# Altium footprint library Terminal_Blocks_Pluggable PCB_5.08mm.PcbLib: 299 footprints (part 17 of 19)
Each footprint in its own frame and in the unit in brackets; x right, y up, seen from the top. Pads: shape width x height; smd on the part's side, far side on the other; paste and mask are expansions set on the pad; w line width, h text height; cw(c..) or ccw(c..) is an arc to the next point about the centre after c.
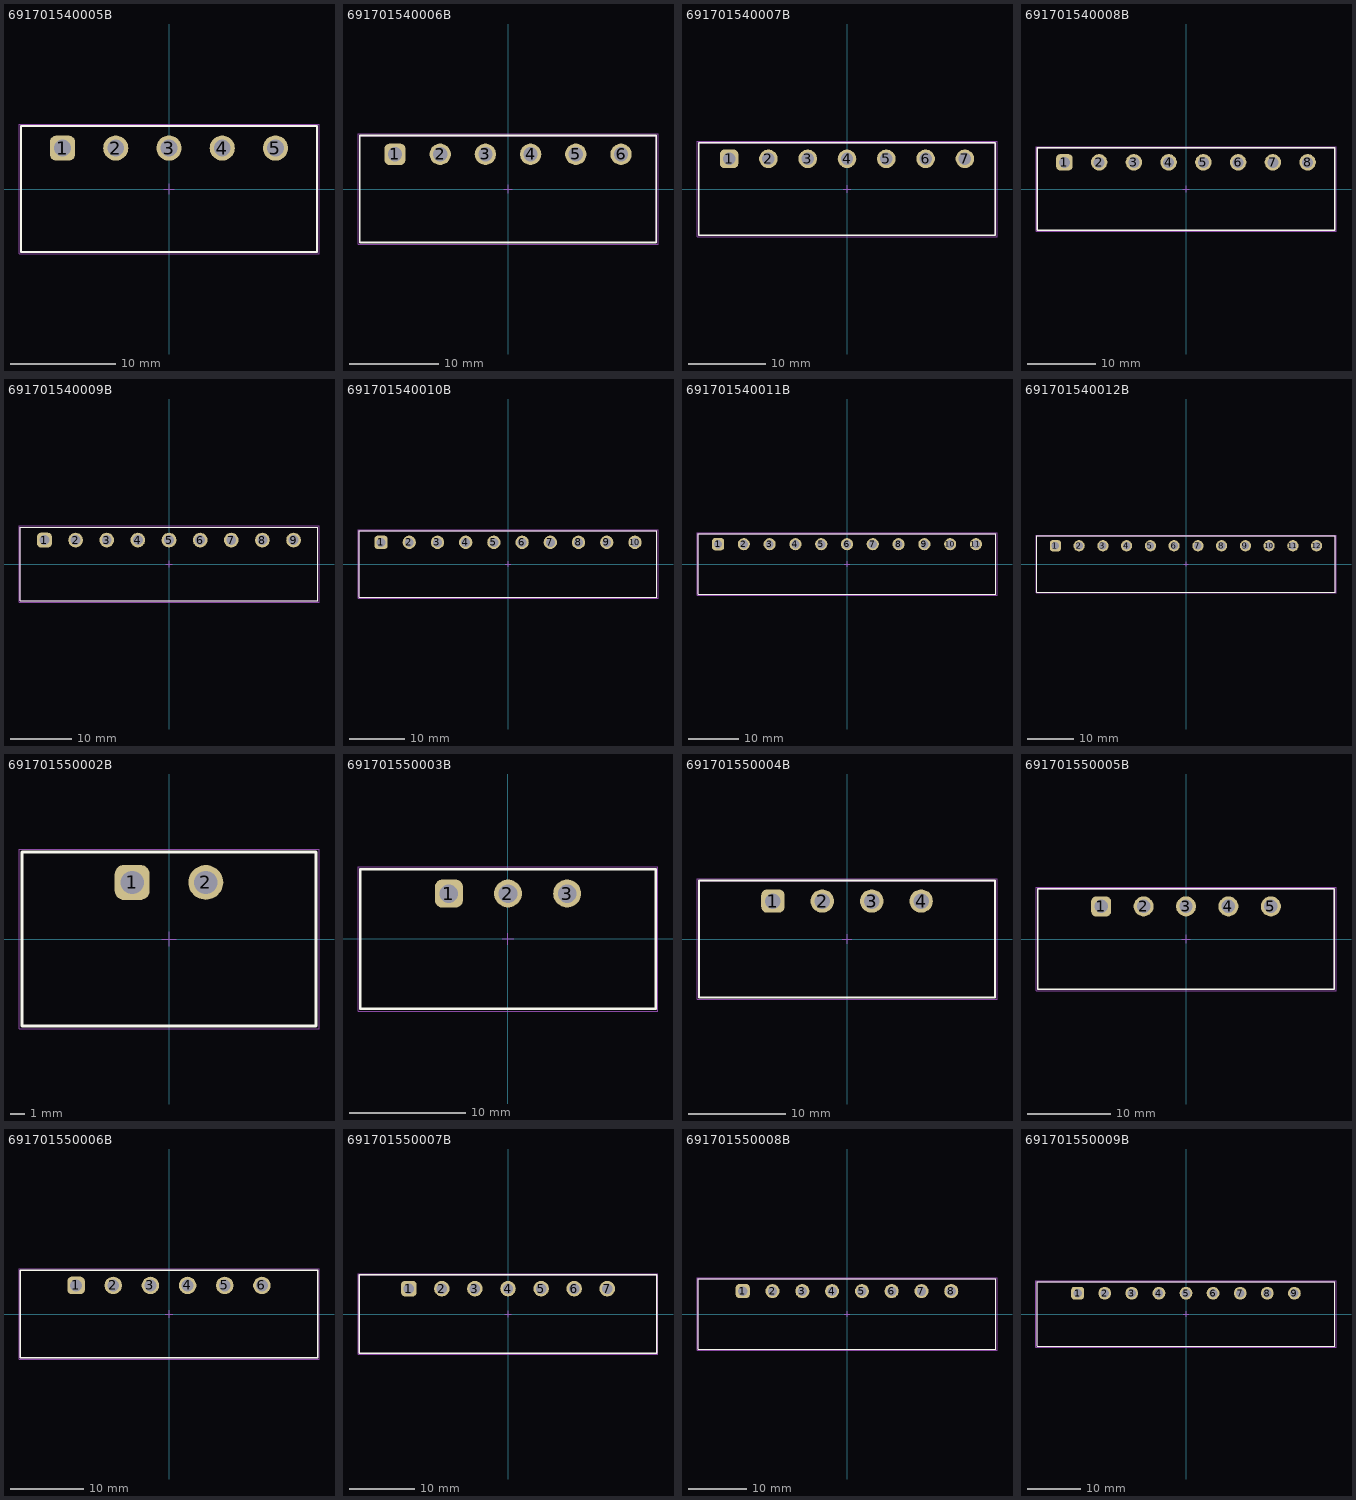
[diagram p16: the footprints below, top view; thin cyan lines are the x and y axes]

## 691701540005B [mm] "THR - 5,08mm - PCB Horizontal Close - 05p"
height 8.5
pads (5):
  rrect50% 2.4x2.4 hole 1.6: 1(-10.16,3.9)
  round 2.4 hole 1.6: 2(-5.08,3.9) 3(0,3.9) 4(5.08,3.9) 5(10.16,3.9)
Top Overlay:
  lines w0.2: -14.11,-6 14.11,-6 14.11,6 -14.11,6 -14.11,-6
Top Designator:
  text ".Designator" at -7.498,-0.5 h1.5
Top Component Outline:
  lines w0.1: -14.11,-6 -14.11,6 14.11,6 14.11,-6 -14.11,-6
Top 3D Body:
  lines w0.1: -14.11,-6 14.11,-6 14.11,6 -14.11,6 -14.11,-6
Top Courtyard:
  lines w0.05: -14.31,-6.2 -14.31,6.2 14.31,6.2 14.31,-6.2 -14.31,-6.2
Top Component Center:
  lines w0.05: -0.5,0 0.5,0 ; 0,-0.5 0,0.5
3D body "691701540005B.stp": height 8.6, standoff -2.7, extent -14.1,-6 14.1,6

## 691701540006B [mm] "THR - 5,08mm - PCB Horizontal Close - 06p"
height 8.5
pads (6):
  rrect50% 2.4x2.4 hole 1.6: 1(-12.7,3.9)
  round 2.4 hole 1.6: 2(-7.62,3.9) 3(-2.54,3.9) 4(2.54,3.9) 5(7.62,3.9) 6(12.7,3.9)
Top Overlay:
  lines w0.2: -16.65,-6 16.65,-6 16.65,6 -16.65,6 -16.65,-6
Top Designator:
  text ".Designator" at -7.498,-0.5 h1.5
Top Component Outline:
  lines w0.1: -16.65,-6 -16.65,6 16.65,6 16.65,-6 -16.65,-6
Top 3D Body:
  lines w0.1: -16.65,-6 16.65,-6 16.65,6 -16.65,6 -16.65,-6
Top Courtyard:
  lines w0.05: -16.85,-6.2 -16.85,6.2 16.85,6.2 16.85,-6.2 -16.85,-6.2
Top Component Center:
  lines w0.05: -0.5,0 0.5,0 ; 0,-0.5 0,0.5
3D body "691701540006B.stp": height 8.6, standoff -2.7, extent -16.64,-6 16.64,6

## 691701540007B [mm] "THR - 5,08mm - PCB Horizontal Close - 07p"
height 8.5
pads (7):
  rrect50% 2.4x2.4 hole 1.6: 1(-15.24,3.9)
  round 2.4 hole 1.6: 2(-10.16,3.9) 3(-5.08,3.9) 4(0,3.9) 5(5.08,3.9) 6(10.16,3.9) 7(15.24,3.9)
Top Overlay:
  lines w0.2: -19.19,-6 -19.19,6 19.19,6 19.19,-6 -19.19,-6
Top Designator:
  text ".Designator" at -7.498,-0.5 h1.5
Top Component Outline:
  lines w0.1: -19.19,-6 19.19,-6 19.19,6 -19.19,6 -19.19,-6
Top 3D Body:
  lines w0.1: -19.19,-6 -19.19,6 19.19,6 19.19,-6 -19.19,-6
Top Courtyard:
  lines w0.05: -19.39,-6.2 19.39,-6.2 19.39,6.2 -19.39,6.2 -19.39,-6.2
Top Component Center:
  lines w0.05: -0.5,0 0.5,0 ; 0,-0.5 0,0.5
3D body "691701540007B.stp": height 8.6, standoff -2.7, extent -19.18,-6 19.18,6

## 691701540008B [mm] "THR - 5,08mm - PCB Horizontal Close - 08p"
height 8.5
pads (8):
  rrect50% 2.4x2.4 hole 1.6: 1(-17.78,3.9)
  round 2.4 hole 1.6: 2(-12.7,3.9) 3(-7.62,3.9) 4(-2.54,3.9) 5(2.54,3.9) 6(7.62,3.9) 7(12.7,3.9) 8(17.78,3.9)
Top Overlay:
  lines w0.2: -21.73,-6 -21.73,6 21.73,6 21.73,-6 -21.73,-6
Top Designator:
  text ".Designator" at -7.498,-0.5 h1.5
Top Component Outline:
  lines w0.1: -21.73,-6 21.73,-6 21.73,6 -21.73,6 -21.73,-6
Top 3D Body:
  lines w0.1: -21.73,-6 -21.73,6 21.73,6 21.73,-6 -21.73,-6
Top Courtyard:
  lines w0.05: -21.93,-6.2 21.93,-6.2 21.93,6.2 -21.93,6.2 -21.93,-6.2
Top Component Center:
  lines w0.05: -0.5,0 0.5,0 ; 0,-0.5 0,0.5
3D body "691701540008B.stp": height 8.6, standoff -2.7, extent -21.72,-6 21.72,6

## 691701540009B [mm] "THR - 5,08mm - PCB Horizontal Close - 09p"
height 8.5
pads (9):
  rrect50% 2.4x2.4 hole 1.6: 1(-20.32,3.9)
  round 2.4 hole 1.6: 2(-15.24,3.9) 3(-10.16,3.9) 4(-5.08,3.9) 5(0,3.9) 6(5.08,3.9) 7(10.16,3.9) 8(15.24,3.9) 9(20.32,3.9)
Top Overlay:
  lines w0.2: -24.27,-6 -24.27,6 24.27,6 24.27,-6 -24.27,-6
Top Designator:
  text ".Designator" at -7.498,-0.5 h1.5
Top Component Outline:
  lines w0.1: -24.27,-6 24.27,-6 24.27,6 -24.27,6 -24.27,-6
Top 3D Body:
  lines w0.1: -24.27,-6 -24.27,6 24.27,6 24.27,-6 -24.27,-6
Top Courtyard:
  lines w0.05: -24.47,-6.2 24.47,-6.2 24.47,6.2 -24.47,6.2 -24.47,-6.2
Top Component Center:
  lines w0.05: -0.5,0 0.5,0 ; 0,-0.5 0,0.5
3D body "691701540009B.stp": height 8.6, standoff -2.7, extent -24.26,-6 24.26,6

## 691701540010B [mm] "THR - 5,08mm - PCB Horizontal Close - 10p"
height 8.5
pads (10):
  rrect50% 2.4x2.4 hole 1.6: 1(-22.86,3.9)
  round 2.4 hole 1.6: 2(-17.78,3.9) 3(-12.7,3.9) 4(-7.62,3.9) 5(-2.54,3.9) 6(2.54,3.9) 7(7.62,3.9) 8(12.7,3.9) 9(17.78,3.9) 10(22.86,3.9)
Top Overlay:
  lines w0.2: -26.81,-6 -26.81,6 26.81,6 26.81,-6 -26.81,-6
Top Designator:
  text ".Designator" at -7.498,-0.5 h1.5
Top Component Outline:
  lines w0.1: -26.81,-6 26.81,-6 26.81,6 -26.81,6 -26.81,-6
Top 3D Body:
  lines w0.1: -26.81,-6 -26.81,6 26.81,6 26.81,-6 -26.81,-6
Top Courtyard:
  lines w0.05: -27.01,-6.2 27.01,-6.2 27.01,6.2 -27.01,6.2 -27.01,-6.2
Top Component Center:
  lines w0.05: -0.5,0 0.5,0 ; 0,-0.5 0,0.5
3D body "691701540010B.stp": height 8.6, standoff -2.7, extent -26.8,-6 26.8,6

## 691701540011B [mm] "THR - 5,08mm - PCB Horizontal Close - 11p"
height 8.5
pads (11):
  rrect50% 2.4x2.4 hole 1.6: 1(-25.4,3.9)
  round 2.4 hole 1.6: 2(-20.32,3.9) 3(-15.24,3.9) 4(-10.16,3.9) 5(-5.08,3.9) 6(0,3.9) 7(5.08,3.9) 8(10.16,3.9) 9(15.24,3.9) 10(20.32,3.9) 11(25.4,3.9)
Top Overlay:
  lines w0.2: -29.35,-6 -29.35,6 29.35,6 29.35,-6 -29.35,-6
Top Designator:
  text ".Designator" at -7.498,-0.5 h1.5
Top Component Outline:
  lines w0.1: -29.35,-6 29.35,-6 29.35,6 -29.35,6 -29.35,-6
Top 3D Body:
  lines w0.1: -29.35,-6 -29.35,6 29.35,6 29.35,-6 -29.35,-6
Top Courtyard:
  lines w0.05: -29.55,-6.2 29.55,-6.2 29.55,6.2 -29.55,6.2 -29.55,-6.2
Top Component Center:
  lines w0.05: -0.5,0 0.5,0 ; 0,-0.5 0,0.5
3D body "691701540011B.stp": height 8.6, standoff -2.7, extent -29.34,-6 29.34,6

## 691701540012B [mm] "THR - 5,08mm - PCB Horizontal Close - 12p"
height 8.5
pads (12):
  rrect50% 2.4x2.4 hole 1.6: 1(-27.94,3.9)
  round 2.4 hole 1.6: 2(-22.86,3.9) 3(-17.78,3.9) 4(-12.7,3.9) 5(-7.62,3.9) 6(-2.54,3.9) 7(2.54,3.9) 8(7.62,3.9) 9(12.7,3.9) 10(17.78,3.9) 11(22.86,3.9) 12(27.94,3.9)
Top Overlay:
  lines w0.2: -31.89,-6 -31.89,6 31.89,6 31.89,-6 -31.89,-6
Top Designator:
  text ".Designator" at -7.498,-0.5 h1.5
Top Component Outline:
  lines w0.1: -31.89,-6 31.89,-6 31.89,6 -31.89,6 -31.89,-6
Top 3D Body:
  lines w0.1: -31.89,-6 -31.89,6 31.89,6 31.89,-6 -31.89,-6
Top Courtyard:
  lines w0.05: -32.09,-6.2 32.09,-6.2 32.09,6.2 -32.09,6.2 -32.09,-6.2
Top Component Center:
  lines w0.05: -0.5,0 0.5,0 ; 0,-0.5 0,0.5
3D body "691701540012B.stp": height 8.6, standoff -2.7, extent -31.88,-6 31.88,6

## 691701550002B [mm] "THR - 5,08mm - PCB Horizontal Flange - 02p"
height 8.4
pads (2):
  rrect50% 2.4x2.4 hole 1.6: 1(-2.54,3.9)
  round 2.4 hole 1.6: 2(2.54,3.9)
Top Overlay:
  lines w0.2: -10.14,-6 10.14,-6 10.14,6 -10.14,6 -10.14,-6
Top Designator:
  text ".Designator" at -7.498,-0.5 h1.5
Top Component Outline:
  lines w0.1: -10.14,-6 -10.14,6 10.14,6 10.14,-6 -10.14,-6
Top 3D Body:
  lines w0.1: -10.14,-6 10.14,-6 10.14,6 -10.14,6 -10.14,-6
Top Courtyard:
  lines w0.05: -10.34,-6.2 10.34,-6.2 10.34,6.2 -10.34,6.2 -10.34,-6.2
Top Component Center:
  lines w0.05: -0.5,0 0.5,0 ; 0,-0.5 0,0.5
3D body "691701550002B.stp": height 8.55, standoff -2.75, extent -10.14,-6 10.18,6

## 691701550003B [mm] "THR - 5,08mm - PCB Horizontal Flange - 03p"
height 8.4
pads (3):
  rrect50% 2.4x2.4 hole 1.6: 1(-5.08,3.9)
  round 2.4 hole 1.6: 2(0,3.9) 3(5.08,3.9)
Top Overlay:
  lines w0.2: -12.68,-6 12.68,-6 12.68,6 -12.68,6 -12.68,-6
Top Designator:
  text ".Designator" at -7.498,-0.5 h1.5
Top Component Outline:
  lines w0.1: -12.68,-6 -12.68,6 12.68,6 12.68,-6 -12.68,-6
Top 3D Body:
  lines w0.1: -12.68,-6 12.68,-6 12.68,6 -12.68,6 -12.68,-6
Top Courtyard:
  lines w0.05: -12.88,-6.2 12.88,-6.2 12.88,6.2 -12.88,6.2 -12.88,-6.2
Top Component Center:
  lines w0.05: -0.5,0 0.5,0 ; 0,-0.5 0,0.5
3D body "691701550003B.stp": height 8.55, standoff -2.75, extent -12.7,-6 12.7,6

## 691701550004B [mm] "THR - 5,08mm - PCB Horizontal Flange - 04p"
height 8.4
pads (4):
  rrect50% 2.4x2.4 hole 1.6: 1(-7.62,3.9)
  round 2.4 hole 1.6: 2(-2.54,3.9) 3(2.54,3.9) 4(7.62,3.9)
Top Overlay:
  lines w0.2: -15.22,-6 15.22,-6 15.22,6 -15.22,6 -15.22,-6
Top Designator:
  text ".Designator" at -7.498,-0.5 h1.5
Top Component Outline:
  lines w0.1: -15.22,-6 -15.22,6 15.22,6 15.22,-6 -15.22,-6
Top 3D Body:
  lines w0.1: -15.22,-6 15.22,-6 15.22,6 -15.22,6 -15.22,-6
Top Courtyard:
  lines w0.05: -15.42,-6.2 15.42,-6.2 15.42,6.2 -15.42,6.2 -15.42,-6.2
Top Component Center:
  lines w0.05: -0.5,0 0.5,0 ; 0,-0.5 0,0.5
3D body "691701550004B.stp": height 8.55, standoff -2.75, extent -15.24,-6 15.24,6

## 691701550005B [mm] "THR - 5,08mm - PCB Horizontal Flange - 05p"
height 8.4
pads (5):
  rrect50% 2.4x2.4 hole 1.6: 1(-10.16,3.9)
  round 2.4 hole 1.6: 2(-5.08,3.9) 3(0,3.9) 4(5.08,3.9) 5(10.16,3.9)
Top Overlay:
  lines w0.2: -17.76,-6 -17.76,6 17.76,6 17.76,-6 -17.76,-6
Top Designator:
  text ".Designator" at -7.498,-0.5 h1.5
Top Component Outline:
  lines w0.1: -17.76,-6 17.76,-6 17.76,6 -17.76,6 -17.76,-6
Top 3D Body:
  lines w0.1: -17.76,-6 -17.76,6 17.76,6 17.76,-6 -17.76,-6
Top Courtyard:
  lines w0.05: -17.96,-6.2 -17.96,6.2 17.96,6.2 17.96,-6.2 -17.96,-6.2
Top Component Center:
  lines w0.05: -0.5,0 0.5,0 ; 0,-0.5 0,0.5
3D body "691701550005B.stp": height 8.55, standoff -2.75, extent -17.78,-6 17.78,6

## 691701550006B [mm] "THR - 5,08mm - PCB Horizontal Flange - 06p"
height 8.4
pads (6):
  rrect50% 2.4x2.4 hole 1.6: 1(-12.7,3.9)
  round 2.4 hole 1.6: 2(-7.62,3.9) 3(-2.54,3.9) 4(2.54,3.9) 5(7.62,3.9) 6(12.7,3.9)
Top Overlay:
  lines w0.2: -20.3,-6 -20.3,6 20.3,6 20.3,-6 -20.3,-6
Top Designator:
  text ".Designator" at -7.498,-0.5 h1.5
Top Component Outline:
  lines w0.1: -20.3,-6 20.3,-6 20.3,6 -20.3,6 -20.3,-6
Top 3D Body:
  lines w0.1: -20.3,-6 -20.3,6 20.3,6 20.3,-6 -20.3,-6
Top Courtyard:
  lines w0.05: -20.5,-6.2 -20.5,6.2 20.5,6.2 20.5,-6.2 -20.5,-6.2
Top Component Center:
  lines w0.05: -0.5,0 0.5,0 ; 0,-0.5 0,0.5
3D body "691701550006B.stp": height 8.55, standoff -2.75, extent -20.32,-6 20.32,6

## 691701550007B [mm] "THR - 5,08mm - PCB Horizontal Flange - 07p"
height 8.4
pads (7):
  rrect50% 2.4x2.4 hole 1.6: 1(-15.24,3.9)
  round 2.4 hole 1.6: 2(-10.16,3.9) 3(-5.08,3.9) 4(0,3.9) 5(5.08,3.9) 6(10.16,3.9) 7(15.24,3.9)
Top Overlay:
  lines w0.2: -22.84,-6 -22.84,6 22.84,6 22.84,-6 -22.84,-6
Top Designator:
  text ".Designator" at -7.498,-0.5 h1.5
Top Component Outline:
  lines w0.1: -22.84,-6 22.84,-6 22.84,6 -22.84,6 -22.84,-6
Top 3D Body:
  lines w0.1: -22.84,-6 -22.84,6 22.84,6 22.84,-6 -22.84,-6
Top Courtyard:
  lines w0.05: -23.04,-6.2 -23.04,6.2 23.04,6.2 23.04,-6.2 -23.04,-6.2
Top Component Center:
  lines w0.05: -0.5,0 0.5,0 ; 0,-0.5 0,0.5
3D body "691701550007B.stp": height 8.55, standoff -2.75, extent -22.86,-6 22.86,6

## 691701550008B [mm] "THR - 5,08mm - PCB Horizontal Flange - 08p"
height 8.4
pads (8):
  rrect50% 2.4x2.4 hole 1.6: 1(-17.78,3.9)
  round 2.4 hole 1.6: 2(-12.7,3.9) 3(-7.62,3.9) 4(-2.54,3.9) 5(2.54,3.9) 6(7.62,3.9) 7(12.7,3.9) 8(17.78,3.9)
Top Overlay:
  lines w0.2: -25.38,-6 25.38,-6 25.38,6 -25.38,6 -25.38,-6
Top Designator:
  text ".Designator" at -7.498,-0.5 h1.5
Top Component Outline:
  lines w0.1: -25.38,-6 -25.38,6 25.38,6 25.38,-6 -25.38,-6
Top 3D Body:
  lines w0.1: -25.38,-6 25.38,-6 25.38,6 -25.38,6 -25.38,-6
Top Courtyard:
  lines w0.05: -25.58,-6.2 25.58,-6.2 25.58,6.2 -25.58,6.2 -25.58,-6.2
Top Component Center:
  lines w0.05: -0.5,0 0.5,0 ; 0,-0.5 0,0.5
3D body "691701550008B.stp": height 8.55, standoff -2.75, extent -25.4,-6 25.4,6

## 691701550009B [mm] "THR - 5,08mm - PCB Horizontal Flange - 09p"
height 8.4
pads (9):
  rrect50% 2.4x2.4 hole 1.6: 1(-20.32,3.9)
  round 2.4 hole 1.6: 2(-15.24,3.9) 3(-10.16,3.9) 4(-5.08,3.9) 5(0,3.9) 6(5.08,3.9) 7(10.16,3.9) 8(15.24,3.9) 9(20.32,3.9)
Top Overlay:
  lines w0.2: -27.92,-6 -27.92,6 27.92,6 27.92,-6 -27.92,-6
Top Designator:
  text ".Designator" at -7.498,-0.5 h1.5
Top Component Outline:
  lines w0.1: -27.92,-6 27.92,-6 27.92,6 -27.92,6 -27.92,-6
Top 3D Body:
  lines w0.1: -27.92,-6 -27.92,6 27.92,6 27.92,-6 -27.92,-6
Top Courtyard:
  lines w0.05: -28.12,-6.2 -28.12,6.2 28.12,6.2 28.12,-6.2 -28.12,-6.2
Top Component Center:
  lines w0.05: -0.5,0 0.5,0 ; 0,-0.5 0,0.5
3D body "691701550009B.stp": height 8.55, standoff -2.75, extent -27.94,-6 27.94,6